# Altium schematic symbol library inductor_power.SchLib: 1 symbol
Pins are listed as number, name and electrical type; pins without a type are passive.

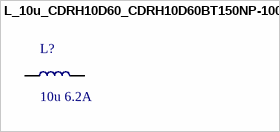
[diagram p0: symbol L_10u_CDRH10D60_CDRH10D60BT150NP-100MC]

## L_10u_CDRH10D60_CDRH10D60BT150NP-100MC
designator L?, comment 10u 6.2A
10 uH 20%, DCR 17 mOhm +/-30%, Isat 6.2 A, Itemp 6.9 A, shielded, AEC-Q200; Manufacturer: Sumida; MPN: CDRH10D60BT150NP-100MC; Value: 10u 6.2A; LCSC: C2594362; JLCPCB Type: Extended; Datasheet: CDRH10D60BT150NP-100MC_C2594362.pdf
footprint IND_CDRH10D60
pins: 1, 2